# Altium footprint library Gateway_Academic.PcbLib: 49 footprints (part 1 of 4)
Each footprint in its own frame and in the unit in brackets; x right, y up, seen from the top. Pads: shape width x height; smd on the part's side, far side on the other; paste and mask are expansions set on the pad; w line width, h text height; cw(c..) or ccw(c..) is an arc to the next point about the centre after c.
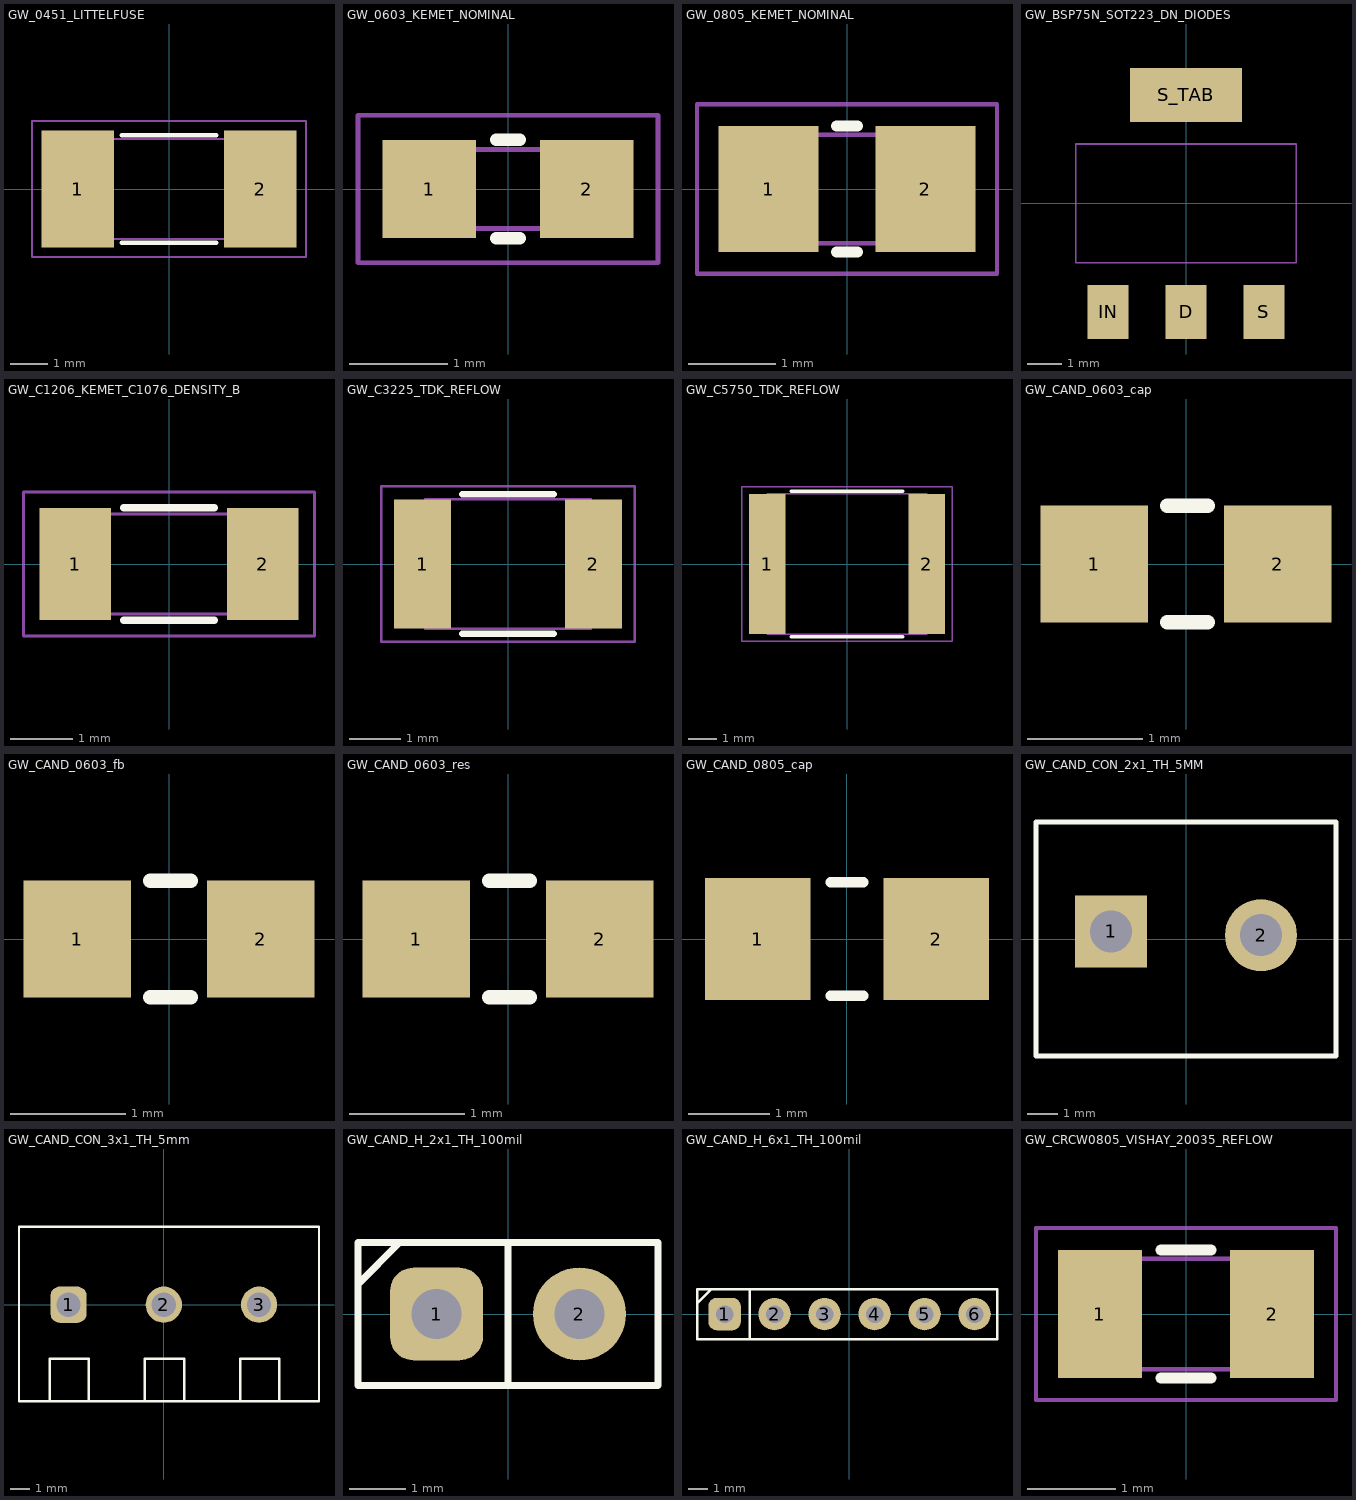
[diagram p0: the footprints below, top view; thin cyan lines are the x and y axes]

## GW_0451_LITTELFUSE [mm] "Littelfuse451/453 manufacturer recommended pad layout; saved historical p371; current2025p4 identical dimension list; Nonpolar project1/2; pad1.955x3.15 rounds1.96; centers4.905; outside6.86,inside2.95. No holder."
pads (2):
  rect 1.955x3.15 smd paste+0 mask+0.025: 1(-2.452,0) 2(2.452,0)
Top Overlay:
  lines w0.127: -1.27,-1.445 1.27,-1.445 ; -1.27,1.445 1.27,1.445
Mechanical 1:
  lines w0.05: -3.05,-1.345 3.05,-1.345 3.05,1.345 -3.05,1.345 -3.05,-1.345
Mechanical 15:
  lines w0.05: -3.68,-1.825 3.68,-1.825 3.68,1.825 -3.68,1.825 -3.68,-1.825
3D body: height 2.69, standoff 0, extent -3.05,-1.345 3.05,1.345

## GW_0603_KEMET_NOMINAL [mm] "KEMET C0603C680J5GACTU exact manufacturer spec; shared1608 body; KEMET C1027Table3p12 nominal1608 lands; Nominal C=.80,Y=.95,X=1.00; manufacturer land geometry reused for same0603 body. Timing option DNP."
pads (2):
  rect 0.95x1 smd paste+0 mask+0.025: 1(-0.8,0) 2(0.8,0)
Top Overlay:
  lines w0.127: -0.12,-0.5 0.12,-0.5 ; -0.12,0.5 0.12,0.5
Mechanical 1:
  lines w0.05: -0.8,-0.4 0.8,-0.4 0.8,0.4 -0.8,0.4 -0.8,-0.4
Mechanical 15:
  lines w0.05: -1.525,-0.75 1.525,-0.75 1.525,0.75 -1.525,0.75 -1.525,-0.75
3D body: height 0.87, standoff 0, extent -0.8,-0.4 0.8,0.4

## GW_0805_KEMET_NOMINAL [mm] "KEMET exact0805 spec body/termination dimensions; KEMET C1027 p12 Table3 nominal2012 reflow lands transferred to mechanically matching commercial0805; Nominal C=.90,Y=1.15,X=1.45. Mechanical reuse from KEMET table; no COTS electrical qualification claimed; same2012case checked."
pads (2):
  rect 1.15x1.45 smd paste+0 mask+0.025: 1(-0.9,0) 2(0.9,0)
Top Overlay:
  lines w0.127: -0.12,-0.725 0.12,-0.725 ; -0.12,0.725 0.12,0.725
Mechanical 1:
  lines w0.05: -1,-0.625 1,-0.625 1,0.625 -1,0.625 -1,-0.625
Mechanical 15:
  lines w0.05: -1.725,-0.975 1.725,-0.975 1.725,0.975 -1.725,0.975 -1.725,-0.975
3D body: height 1.4, standoff 0, extent -1,-0.625 1,0.625

## GW_BSP75N_SOT223_DN_DIODES [mm] "Diodes DS33016 Rev7-2 Jan2024 p1 Top View Pin Out, p8 Suggested Pad Layout; functional pad identifiers preserve original symbol pins; C2.30 C1=6.40 X1.20 X1=3.30 Y1.60 Y1=1.60 Y2=8.00mm; mask+.05/paste1:1 explicit prototype process."
pads (4):
  rect 1.2x1.6 smd paste+0 mask+0.05: D(0,-3.2) IN(-2.3,-3.2) S(2.3,-3.2)
  rect 3.3x1.6 smd paste+0 mask+0.05: S_TAB(0,3.2)
Mechanical 1:
  lines w0.05: -3.25,-1.75 3.25,-1.75 3.25,1.75 -3.25,1.75 -3.25,-1.75

## GW_C1206_KEMET_C1076_DENSITY_B [mm] "KEMET C1076p10 Table3 DensityB1206:C1.50,Y1.15,X1.80mm; centers3.00; gap1.85; body3.2x1.6mm. Mask+.05/paste1:1 process choices, not safety insulation geometry."
pads (2):
  rect 1.15x1.8 smd paste+0 mask+0.05: 1(-1.5,0) 2(1.5,0)
Top Overlay:
  lines w0.127: -0.72,-0.9 0.72,-0.9 ; -0.72,0.9 0.72,0.9
Mechanical 1:
  lines w0.05: -1.6,-0.8 1.6,-0.8 1.6,0.8 -1.6,0.8 -1.6,-0.8
Mechanical 15:
  lines w0.05: -2.325,-1.15 2.325,-1.15 2.325,1.15 -2.325,1.15 -2.325,-1.15
3D body: height 1.8, standoff 0, extent -1.6,-0.8 1.6,0.8

## GW_C3225_TDK_REFLOW [mm] "TDK official C3225X7R1C156M250AB product page lands PA2.0-2.4 PB1.0-1.2 PC1.9-2.5; TI table10-1 rated45uF example; Selected PA2.20 gap/PB1.10 padlength/PC2.50 height, no generic1210 default; 16V output only."
pads (2):
  rect 1.1x2.5 smd paste+0 mask+0.025: 1(-1.65,0) 2(1.65,0)
Top Overlay:
  lines w0.127: -0.88,-1.35 0.88,-1.35 ; -0.88,1.35 0.88,1.35
Mechanical 1:
  lines w0.05: -1.6,-1.25 1.6,-1.25 1.6,1.25 -1.6,1.25 -1.6,-1.25
Mechanical 15:
  lines w0.05: -2.45,-1.5 2.45,-1.5 2.45,1.5 -2.45,1.5 -2.45,-1.5
3D body: height 2.5, standoff 0, extent -1.6,-1.25 1.6,1.25

## GW_C5750_TDK_REFLOW [mm] "TDK C5750X7R2A475K230KA exact2014web-derived PDF p1 lands,p2 DCbias; current official product page same PA/PB/PC; Selected PA4.40 gap/PB1.30 length/PC5.00 height within manufacturer4.1-4.8/1.2-1.4/4-5 ranges."
pads (2):
  rect 1.3x5 smd paste+0 mask+0.025: 1(-2.85,0) 2(2.85,0)
Top Overlay:
  lines w0.127: -1.99,-2.6 1.99,-2.6 ; -1.99,2.6 1.99,2.6
Mechanical 1:
  lines w0.05: -2.85,-2.5 2.85,-2.5 2.85,2.5 -2.85,2.5 -2.85,-2.5
Mechanical 15:
  lines w0.05: -3.75,-2.75 3.75,-2.75 3.75,2.75 -3.75,2.75 -3.75,-2.75
3D body: height 2.3, standoff 0, extent -2.85,-2.5 2.85,2.5

## GW_CAND_0603_cap [mil] "CAD_CANDIDATE; professor geometry inspected; exact MPN land/mask/paste unqualified."
pads (2):
  rect 37x40 smd: 1(-31.5,0) 2(31.5,0)
Top Overlay:
  lines w5: -6.5,-20 7.5,-20 ; -6.5,20 7.5,20
3D body "CircuitWorks-CAPACITOR 0603.STEP": height 34.36, standoff 0.5, extent -31.5,-16.93 31.5,16.93

## GW_CAND_0603_fb [mil] "CAD_CANDIDATE; professor geometry inspected; exact MPN land/mask/paste unqualified."
pads (2):
  rect 37x40 smd: 1(-31.5,0) 2(31.5,0)
Top Overlay:
  lines w5: -6.5,-20 7.5,-20 ; -6.5,20 7.5,20
3D body "742792602.stp": height 32, standoff 0.5, extent -31.5,-15.75 31.49,15.75

## GW_CAND_0603_res [mil] "CAD_CANDIDATE; professor geometry inspected; exact MPN land/mask/paste unqualified. 1608 Metric / 20190225 / C-A.Serna.A"
pads (2):
  rect 37x40 smd: 1(-31.5,0) 2(31.5,0)
Top Overlay:
  lines w5: -6.5,-20 7.5,-20 ; -6.5,20 7.5,20
3D body "C0603.step": height 11.89, standoff 0, extent -31.5,-15.75 31.5,15.75

## GW_CAND_0805_cap [mm] "CAD_CANDIDATE; professor geometry inspected; exact MPN land/mask/paste unqualified."
pads (2):
  rect 1.3x1.5 smd: 1(-1.1,0) 2(1.1,0)
Top Overlay:
  lines w0.127: -0.2,-0.7 0.2,-0.7 ; -0.2,0.7 0.2,0.7
3D body: height 1, standoff 0, extent -1.125,-0.7 1.075,0.7

## GW_CAND_CON_2x1_TH_5MM [mm] "CAD_CANDIDATE; professor geometry inspected; exact MPN land/mask/paste unqualified."
pads (2):
  rect 2.4x2.4 hole 1.4: 1(-2.5,0.254)
  round 2.4 hole 1.4: 2(2.5,0.127)
Top Overlay:
  lines w0.152: -5,-3.9 5,-3.9 5,3.9 -5,3.9 -5,-3.9
3D body: height 10.2, standoff 0, extent -5,-3.9 5,3.9

## GW_CAND_CON_3x1_TH_5mm [mm] "CAD_CANDIDATE; professor geometry inspected; exact MPN land/mask/paste unqualified."
pads (3):
  rrect50% 1.9x1.9 hole 1.27: 1(-5,0)
  round 1.9 hole 1.27: 2(0,0) 3(5,0)
Top Overlay:
  lines w0.127: -5.99,-5.08 -5.99,-2.83 -3.93,-2.83 -3.93,-5.08 ; -0.99,-5.08 -0.99,-2.83 1.07,-2.83 1.07,-5.077 ; 4.01,-5.08 4.01,-2.83 6.07,-2.83 6.07,-5.08 ; -7.603,-5.08 8.148,-5.08 8.148,4.102 -7.603,4.102 -7.603,-5.08
3D body "pxc_1935174_03_PT-1-5-3-5-0-H_3D.stp": height 11.7, standoff -3.2, extent -7.507,-4.988 8.063,4.012

## GW_CAND_H_2x1_TH_100mil [mil] "CAD_CANDIDATE; professor geometry inspected; exact MPN land/mask/paste unqualified."
pads (2):
  rrect50% 65x65 hole 35: 1(-50,0)
  round 65 hole 35: 2(50,0)
Top Overlay:
  lines w5: -105,20.87 -75.87,50 ; 0,-50 0,50 ; -105,-50 105,-50 105,50 -105,50 -105,-50
3D body "PH1-02-UA.STEP": height 338.58, standoff -116.14, extent -100.8,-49.16 99.48,49.26

## GW_CAND_H_6x1_TH_100mil [mil] "CAD_CANDIDATE; professor geometry inspected; exact MPN land/mask/paste unqualified."
pads (6):
  rrect50% 65x65 hole 35: 1(-250,0)
  round 65 hole 35: 2(-150,0) 3(-50,0) 4(50,0) 5(150,0) 6(250,0)
Top Overlay:
  lines w5: -305,20.87 -275.87,50 ; -200,-50 -200,50 ; -305,-50 -305,50 295,50 295,-50 -305,-50

## GW_CRCW0805_VISHAY_20035_REFLOW [mm] "Vishay20035p9 reflow0805 G1.00 Y0.95 X1.45 Z2.90mm; centers1.95mm; body2.0x1.25mm. Mask+.05/paste1:1 prototype process choices."
pads (2):
  rect 0.95x1.45 smd paste+0 mask+0.05: 1(-0.975,0) 2(0.975,0)
Top Overlay:
  lines w0.127: -0.28,-0.725 0.28,-0.725 ; -0.28,0.725 0.28,0.725
Mechanical 1:
  lines w0.05: -1,-0.625 1,-0.625 1,0.625 -1,0.625 -1,-0.625
Mechanical 15:
  lines w0.05: -1.7,-0.975 1.7,-0.975 1.7,0.975 -1.7,0.975 -1.7,-0.975
3D body: height 0.55, standoff 0, extent -1,-0.625 1,0.625